# Altium footprint library WE-D-SUB.PcbLib: 41 footprints (part 2 of 3)
Each footprint in its own frame and in the unit in brackets; x right, y up, seen from the top. Pads: shape width x height; smd on the part's side, far side on the other; paste and mask are expansions set on the pad; w line width, h text height; cw(c..) or ccw(c..) is an arc to the next point about the centre after c.
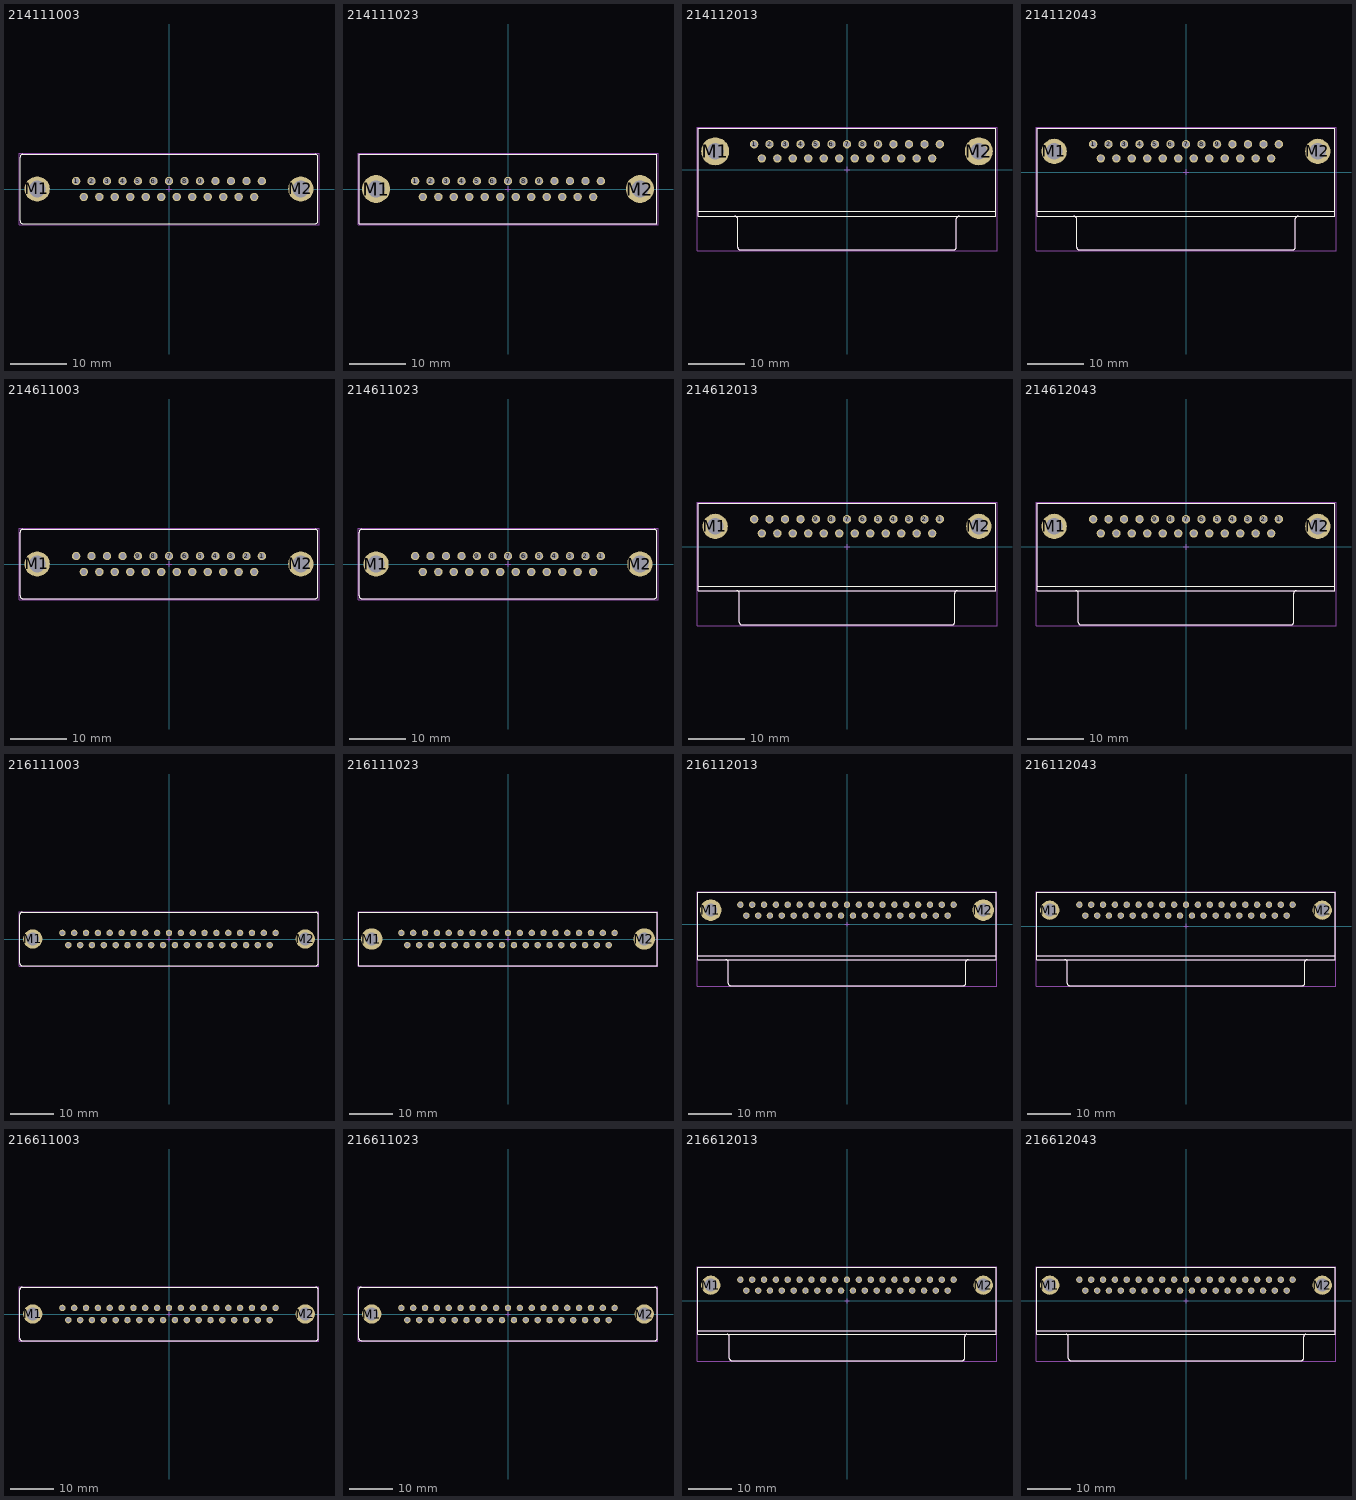
[diagram p1: the footprints below, top view; thin cyan lines are the x and y axes]

## 214111003 [mm] "D-SUB-Filter, Solder Pin Straight, Male, 25p"
height 12.2
pads (27):
  round 1.5 hole 1: 1(-16.56,1.42) 2(-13.82,1.42) 3(-11.05,1.42) 4(-8.28,1.42) 5(-5.54,1.42) 6(-2.77,1.42) 7(0,1.42) 8(2.77,1.42) 9(5.54,1.42) 10(8.28,1.42) 11(11.05,1.42) 12(13.82,1.42) 13(16.56,1.42) 14(-15.19,-1.42) 15(-12.42,-1.42) 16(-9.68,-1.42) 17(-6.91,-1.42) 18(-4.14,-1.42) 19(-1.38,-1.42) 20(1.38,-1.42) 21(4.14,-1.42) 22(6.91,-1.42) 23(9.68,-1.42) 24(12.42,-1.42) 25(15.19,-1.42)
  round 4.5 hole 3: M1(-23.5,0) M2(23.5,0)
Top Overlay:
  lines w0.2: -26.55,-5.7 ccw(c-26.05,-5.7) -26.05,-6.2 26.05,-6.2 ccw(c26.05,-5.7) 26.55,-5.7 26.55,5.7 ccw(c26.05,5.7) 26.05,6.2 -26.05,6.2 ccw(c-26.05,5.7) -26.55,5.7 -26.55,-5.7
Top Courtyard:
  lines w0.05: -0.5,0 0.5,0 ; 0,-0.5 0,0.5 ; -26.75,-6.4 26.75,-6.4 26.75,6.4 -26.75,6.4 -26.75,-6.4
3D body "214111003.stp": height 11.9, standoff -5.1, extent -26.55,-6.2 26.55,6.2

## 214111023 [mm] "D-SUB-Filter, Solder Pin Straight, Male, 25p"
height 11.8
pads (27):
  round 1.5 hole 1: 1(-16.56,1.42) 2(-13.82,1.42) 3(-11.05,1.42) 4(-8.28,1.42) 5(-5.54,1.42) 6(-2.77,1.42) 7(0,1.42) 8(2.77,1.42) 9(5.54,1.42) 10(8.28,1.42) 11(11.05,1.42) 12(13.82,1.42) 13(16.56,1.42) 14(-15.19,-1.42) 15(-12.42,-1.42) 16(-9.68,-1.42) 17(-6.91,-1.42) 18(-4.14,-1.42) 19(-1.38,-1.42) 20(1.38,-1.42) 21(4.14,-1.42) 22(6.91,-1.42) 23(9.68,-1.42) 24(12.42,-1.42) 25(15.19,-1.42)
  round 5 hole 3: M1(-23.52,0) M2(23.52,0)
Top Overlay:
  lines w0.2: -26.55,-6.2 26.55,-6.2 26.55,6.2 -26.55,6.2 -26.55,-6.2
Top 3D Body:
  lines w0.1: -26.55,-6.2 -26.55,6.2 26.55,6.2 26.55,-6.2 -26.55,-6.2
Top Courtyard:
  lines w0.05: -0.5,0 0.5,0 ; 0,-0.5 0,0.5 ; -26.75,-6.4 -26.75,6.4 26.75,6.4 26.75,-6.4 -26.75,-6.4
3D body "214111023.stp": height 11.9, standoff -5.1, extent -26.55,-6.2 26.55,6.2

## 214112013 [mm] "D-SUB-Filter, Solder Pin Angled,  Male, 25p"
height 12.4
pads (27):
  round 1.5 hole 1: 1(-16.56,4.54) 2(-13.82,4.54) 3(-11.05,4.54) 4(-8.28,4.54) 5(-5.54,4.54) 6(-2.77,4.54) 7(0,4.54) 8(2.77,4.54) 9(5.54,4.54) 10(8.28,4.54) 11(11.05,4.54) 12(13.82,4.54) 13(16.56,4.54) 14(-15.19,2) 15(-12.42,2) 16(-9.68,2) 17(-6.91,2) 18(-4.14,2) 19(-1.38,2) 20(1.38,2) 21(4.14,2) 22(6.91,2) 23(9.68,2) 24(12.42,2) 25(15.19,2)
  round 5 hole 3: M1(-23.5,3.27) M2(23.5,3.27)
Top Overlay:
  lines w0.2: -26.55,-7.4 26.55,-7.4 ; -20,-8.3 cw(c-20,-8.8) -19.5,-8.8 -19.5,-13.8 ccw(c-19,-13.8) -19,-14.3 19,-14.3 ccw(c19,-13.8) 19.5,-13.8 19.5,-8.8 cw(c20,-8.8) 20,-8.3 ; -26.55,-8.3 -26.55,7.4 26.55,7.4 26.55,-8.3 -26.55,-8.3
Top 3D Body:
  lines w0.1: -26.55,-7.4 26.55,-7.4 ; -20,-8.3 cw(c-20,-8.8) -19.5,-8.8 -19.5,-13.8 ccw(c-19,-13.8) -19,-14.3 19,-14.3 ccw(c19,-13.8) 19.5,-13.8 19.5,-8.8 cw(c20,-8.8) 20,-8.3 ; -26.55,-8.3 26.55,-8.3 26.55,7.4 -26.55,7.4 -26.55,-8.3
Top Courtyard:
  lines w0.05: -0.5,0 0.5,0 ; 0,-0.5 0,0.5 ; -26.75,-14.5 -26.75,7.6 26.75,7.6 26.75,-14.5 -26.75,-14.5
3D body "214112013.stp": height 13.65, standoff -3.55, extent -26.55,-14.3 26.55,7.4

## 214112043 [mm] "D-SUB-Filter Bent 90¡ã THT, Male, 25p"
height 12.4
pads (27):
  round 1.5 hole 1: 1(-16.56,4.99) 2(-13.82,4.99) 3(-11.05,4.99) 4(-8.28,4.99) 5(-5.54,4.99) 6(-2.77,4.99) 7(0,4.99) 8(2.77,4.99) 9(5.54,4.99) 10(8.28,4.99) 11(11.05,4.99) 12(13.82,4.99) 13(16.56,4.99) 14(-15.19,2.45) 15(-12.42,2.45) 16(-9.68,2.45) 17(-6.91,2.45) 18(-4.14,2.45) 19(-1.38,2.45) 20(1.38,2.45) 21(4.14,2.45) 22(6.91,2.45) 23(9.68,2.45) 24(12.42,2.45) 25(15.19,2.45)
  round 4.5 hole 3: M1(-23.5,3.72) M2(23.5,3.72)
Top Overlay:
  lines w0.2: -26.55,-6.95 26.55,-6.95 ; -20,-7.85 cw(c-20,-8.35) -19.5,-8.35 -19.5,-13.35 ccw(c-19,-13.35) -19,-13.85 19,-13.85 ccw(c19,-13.35) 19.5,-13.35 19.5,-8.35 cw(c20,-8.35) 20,-7.85 ; -26.55,-7.85 -26.55,7.85 26.55,7.85 26.55,-7.85 -26.55,-7.85
Top 3D Body:
  lines w0.1: -26.55,-6.95 26.55,-6.95 ; -20,-7.85 cw(c-20,-8.35) -19.5,-8.35 -19.5,-13.35 ccw(c-19,-13.35) -19,-13.85 19,-13.85 ccw(c19,-13.35) 19.5,-13.35 19.5,-8.35 cw(c20,-8.35) 20,-7.85 ; -26.55,-7.85 26.55,-7.85 26.55,7.85 -26.55,7.85 -26.55,-7.85
Top Courtyard:
  lines w0.05: -0.5,0 0.5,0 ; 0,-0.5 0,0.5 ; -26.75,-14.05 -26.75,8.05 26.75,8.05 26.75,-14.05 -26.75,-14.05
3D body "214112043.stp": height 13.75, standoff -3.05, extent -26.55,-13.85 26.55,7.85

## 214611003 [mm] "D-SUB-Filter, Solder Pin Straight, Female, 25p"
height 12.2
pads (27):
  round 1.5 hole 1: 1(16.56,1.42) 2(13.82,1.42) 3(11.05,1.42) 4(8.28,1.42) 5(5.54,1.42) 6(2.77,1.42) 7(0,1.42) 8(-2.77,1.42) 9(-5.54,1.42) 10(-8.28,1.42) 11(-11.05,1.42) 12(-13.82,1.42) 13(-16.56,1.42) 14(15.19,-1.42) 15(12.42,-1.42) 16(9.68,-1.42) 17(6.91,-1.42) 18(4.14,-1.42) 19(1.38,-1.42) 20(-1.38,-1.42) 21(-4.14,-1.42) 22(-6.91,-1.42) 23(-9.68,-1.42) 24(-12.42,-1.42) 25(-15.19,-1.42)
  round 4.5 hole 3: M1(-23.5,0) M2(23.5,0)
Top Overlay:
  lines w0.2: -26.55,-5.7 ccw(c-26.05,-5.7) -26.05,-6.2 26.05,-6.2 ccw(c26.05,-5.7) 26.55,-5.7 26.55,5.7 ccw(c26.05,5.7) 26.05,6.2 -26.05,6.2 ccw(c-26.05,5.7) -26.55,5.7 -26.55,-5.7
Top 3D Body:
  lines w0.1: -26.55,-5.7 ccw(c-26.05,-5.7) -26.05,-6.2 26.05,-6.2 ccw(c26.05,-5.7) 26.55,-5.7 26.55,5.7 ccw(c26.05,5.7) 26.05,6.2 -26.05,6.2 ccw(c-26.05,5.7) -26.55,5.7 -26.55,-5.7
Top Courtyard:
  lines w0.05: -0.5,0 0.5,0 ; 0,-0.5 0,0.5 ; -26.75,-6.4 26.75,-6.4 26.75,6.4 -26.75,6.4 -26.75,-6.4
3D body "214611003.stp": height 11.9, standoff -5.1, extent -26.55,-6.2 26.55,6.2

## 214611023 [mm] "D-SUB-Filter, Solder Pin Straight, Female, 25p"
height 11.8
pads (27):
  round 1.5 hole 1: 1(16.56,1.42) 2(13.82,1.42) 3(11.05,1.42) 4(8.28,1.42) 5(5.54,1.42) 6(2.77,1.42) 7(0,1.42) 8(-2.77,1.42) 9(-5.54,1.42) 10(-8.28,1.42) 11(-11.05,1.42) 12(-13.82,1.42) 13(-16.56,1.42) 14(15.19,-1.42) 15(12.42,-1.42) 16(9.68,-1.42) 17(6.91,-1.42) 18(4.14,-1.42) 19(1.38,-1.42) 20(-1.38,-1.42) 21(-4.14,-1.42) 22(-6.91,-1.42) 23(-9.68,-1.42) 24(-12.42,-1.42) 25(-15.19,-1.42)
  round 4.5 hole 3: M1(-23.52,0) M2(23.52,0)
Top Overlay:
  lines w0.2: -26.55,-5.7 ccw(c-26.05,-5.7) -26.05,-6.2 26.05,-6.2 ccw(c26.05,-5.7) 26.55,-5.7 26.55,5.7 ccw(c26.05,5.7) 26.05,6.2 -26.05,6.2 ccw(c-26.05,5.7) -26.55,5.7 -26.55,-5.7
Top 3D Body:
  lines w0.1: -26.55,-5.7 ccw(c-26.05,-5.7) -26.05,-6.2 26.05,-6.2 ccw(c26.05,-5.7) 26.55,-5.7 26.55,5.7 ccw(c26.05,5.7) 26.05,6.2 -26.05,6.2 ccw(c-26.05,5.7) -26.55,5.7 -26.55,-5.7
Top Courtyard:
  lines w0.05: -0.5,0 0.5,0 ; 0,-0.5 0,0.5 ; -26.75,-6.4 -26.75,6.4 26.75,6.4 26.75,-6.4 -26.75,-6.4
3D body "214611023.stp": height 11.9, standoff -5.1, extent -26.55,-6.2 26.55,6.2

## 214612013 [mm] "D-SUB-Filter Bent 90¡ã THT, Female, 25p"
height 12.4
pads (27):
  round 1.5 hole 1: 1(16.56,4.94) 2(13.82,4.94) 3(11.05,4.94) 4(8.28,4.94) 5(5.54,4.94) 6(2.77,4.94) 7(0,4.94) 8(-2.77,4.94) 9(-5.54,4.94) 10(-8.28,4.94) 11(-11.05,4.94) 12(-13.82,4.94) 13(-16.56,4.94) 14(15.19,2.4) 15(12.42,2.4) 16(9.68,2.4) 17(6.91,2.4) 18(4.14,2.4) 19(1.38,2.4) 20(-1.38,2.4) 21(-4.14,2.4) 22(-6.91,2.4) 23(-9.68,2.4) 24(-12.42,2.4) 25(-15.19,2.4)
  round 4.5 hole 3: M1(-23.5,3.67) M2(23.5,3.67)
Top Overlay:
  lines w0.2: -26.55,-7 26.55,-7 ; -19.7,-7.8 cw(c-19.7,-8.3) -19.2,-8.3 -19.2,-13.4 ccw(c-18.7,-13.4) -18.7,-13.9 18.7,-13.9 ccw(c18.7,-13.4) 19.2,-13.4 19.2,-8.3 cw(c19.7,-8.3) 19.7,-7.8 ; -26.55,-7.8 26.55,-7.8 26.55,7.8 -26.55,7.8 -26.55,-7.8
Top 3D Body:
  lines w0.1: -26.55,-7 26.55,-7 ; -19.7,-7.8 cw(c-19.7,-8.3) -19.2,-8.3 -19.2,-13.4 ccw(c-18.7,-13.4) -18.7,-13.9 18.7,-13.9 ccw(c18.7,-13.4) 19.2,-13.4 19.2,-8.3 cw(c19.7,-8.3) 19.7,-7.8 ; -26.55,-7.8 -26.55,7.8 26.55,7.8 26.55,-7.8 -26.55,-7.8
Top Courtyard:
  lines w0.05: -0.5,0 0.5,0 ; 0,-0.5 0,0.5 ; -26.75,-14.1 -26.75,8 26.75,8 26.75,-14.1 -26.75,-14.1
3D body "214612013.stp": height 13.75, standoff -3.45, extent -26.55,-13.9 26.55,7.8

## 214612043 [mm] "D-SUB-Filter Bent 90¡ã THT, Female, 25p"
height 12.4
pads (27):
  round 1.5 hole 1: 1(16.56,4.94) 2(13.82,4.94) 3(11.05,4.94) 4(8.28,4.94) 5(5.54,4.94) 6(2.77,4.94) 7(0,4.94) 8(-2.77,4.94) 9(-5.54,4.94) 10(-8.28,4.94) 11(-11.05,4.94) 12(-13.82,4.94) 13(-16.56,4.94) 14(15.19,2.4) 15(12.42,2.4) 16(9.68,2.4) 17(6.91,2.4) 18(4.14,2.4) 19(1.38,2.4) 20(-1.38,2.4) 21(-4.14,2.4) 22(-6.91,2.4) 23(-9.68,2.4) 24(-12.42,2.4) 25(-15.19,2.4)
  round 4.5 hole 3: M1(-23.5,3.67) M2(23.5,3.67)
Top Overlay:
  lines w0.2: -26.55,-7 26.55,-7 ; -19.7,-7.8 cw(c-19.7,-8.3) -19.2,-8.3 -19.2,-13.4 ccw(c-18.7,-13.4) -18.7,-13.9 18.7,-13.9 ccw(c18.7,-13.4) 19.2,-13.4 19.2,-8.3 cw(c19.7,-8.3) 19.7,-7.8 ; -26.55,-7.8 26.55,-7.8 26.55,7.8 -26.55,7.8 -26.55,-7.8
Top 3D Body:
  lines w0.1: -26.55,-7 26.55,-7 ; -19.7,-7.8 cw(c-19.7,-8.3) -19.2,-8.3 -19.2,-13.4 ccw(c-18.7,-13.4) -18.7,-13.9 18.7,-13.9 ccw(c18.7,-13.4) 19.2,-13.4 19.2,-8.3 cw(c19.7,-8.3) 19.7,-7.8 ; -26.55,-7.8 -26.55,7.8 26.55,7.8 26.55,-7.8 -26.55,-7.8
Top Courtyard:
  lines w0.05: -0.5,0 0.5,0 ; 0,-0.5 0,0.5 ; -26.75,-14.1 26.75,-14.1 26.75,8 -26.75,8 -26.75,-14.1
3D body "214612043.stp": height 13.75, standoff -3.05, extent -26.55,-13.9 26.55,7.8

## 216111003 [mm] "D-SUB-Filter, Solder Pin Straight, Male, 37p"
height 12.2
pads (39):
  round 1.5 hole 1: 1(-24.84,1.42) 2(-22.1,1.42) 3(-19.33,1.42) 4(-16.56,1.42) 5(-13.82,1.42) 6(-11.05,1.42) 7(-8.28,1.42) 8(-5.54,1.42) 9(-2.77,1.42) 10(0,1.42) 11(2.77,1.42) 12(5.54,1.42) 13(8.28,1.42) 14(11.05,1.42) 15(13.82,1.42) 16(16.56,1.42) 17(19.33,1.42) 18(22.1,1.42) 19(24.84,1.42) 20(-23.47,-1.42) 21(-20.7,-1.42) 22(-17.96,-1.42) 23(-15.19,-1.42) 24(-12.42,-1.42) 25(-9.68,-1.42) 26(-6.91,-1.42) 27(-4.14,-1.42) 28(-1.38,-1.42) 29(1.38,-1.42) 30(4.14,-1.42) 31(6.91,-1.42) 32(9.68,-1.42) 33(12.42,-1.42) 34(15.19,-1.42) 35(17.96,-1.42) 36(20.7,-1.42) 37(23.47,-1.42)
  round 4.5 hole 3: M1(-31.75,0) M2(31.75,0)
Top Overlay:
  lines w0.2: -34.75,-5.7 ccw(c-34.25,-5.7) -34.25,-6.2 34.25,-6.2 ccw(c34.25,-5.7) 34.75,-5.7 34.75,5.7 ccw(c34.25,5.7) 34.25,6.2 -34.25,6.2 ccw(c-34.25,5.7) -34.75,5.7 -34.75,-5.7
Top Courtyard:
  lines w0.05: -0.5,0 0.5,0 ; 0,-0.5 0,0.5 ; -34.95,-6.4 -34.95,6.4 34.95,6.4 34.95,-6.4 -34.95,-6.4
3D body "216111003.stp": height 11.9, standoff -5.1, extent -34.75,-6.2 34.75,6.2

## 216111023 [mm] "D-SUB-Filter, Solder Pin Straight, Male, 37p"
height 11.8
pads (39):
  round 1.5 hole 1: 1(-24.84,1.42) 2(-22.1,1.42) 3(-19.33,1.42) 4(-16.56,1.42) 5(-13.82,1.42) 6(-11.05,1.42) 7(-8.28,1.42) 8(-5.54,1.42) 9(-2.77,1.42) 10(0,1.42) 11(2.77,1.42) 12(5.54,1.42) 13(8.28,1.42) 14(11.05,1.42) 15(13.82,1.42) 16(16.56,1.42) 17(19.33,1.42) 18(22.1,1.42) 19(24.84,1.42) 20(-23.47,-1.42) 21(-20.7,-1.42) 22(-17.96,-1.42) 23(-15.19,-1.42) 24(-12.42,-1.42) 25(-9.68,-1.42) 26(-6.91,-1.42) 27(-4.14,-1.42) 28(-1.385,-1.42) 29(1.385,-1.42) 30(4.14,-1.42) 31(6.91,-1.42) 32(9.68,-1.42) 33(12.42,-1.42) 34(15.19,-1.42) 35(17.96,-1.42) 36(20.7,-1.42) 37(23.47,-1.42)
  round 5 hole 3: M1(-31.75,0) M2(31.75,0)
Top Overlay:
  lines w0.2: -34.75,-6.2 34.75,-6.2 34.75,6.2 -34.75,6.2 -34.75,-6.2
Top 3D Body:
  lines w0.1: -34.75,-6.2 -34.75,6.2 34.75,6.2 34.75,-6.2 -34.75,-6.2
Top Courtyard:
  lines w0.05: -0.5,0 0.5,0 ; 0,-0.5 0,0.5 ; -34.95,-6.4 -34.95,6.4 34.95,6.4 34.95,-6.4 -34.95,-6.4
3D body "216111023.stp": height 11.9, standoff -5.1, extent -34.75,-6.2 34.75,6.2

## 216112013 [mm] "D-SUB-Filter, Solder Pin Angled,  Male, 37p"
height 12.4
pads (39):
  round 1.5 hole 1: 1(-24.84,4.54) 2(-22.1,4.54) 3(-19.33,4.54) 4(-16.56,4.54) 5(-13.82,4.54) 6(-11.05,4.54) 7(-8.28,4.54) 8(-5.54,4.54) 9(-2.77,4.54) 10(0,4.54) 11(2.77,4.54) 12(5.54,4.54) 13(8.28,4.54) 14(11.05,4.54) 15(13.82,4.54) 16(16.56,4.54) 17(19.33,4.54) 18(22.1,4.54) 19(24.84,4.54) 20(-23.47,2) 21(-20.7,2) 22(-17.96,2) 23(-15.19,2) 24(-12.42,2) 25(-9.68,2) 26(-6.91,2) 27(-4.14,2) 28(-1.385,2) 29(1.385,2) 30(4.14,2) 31(6.91,2) 32(9.68,2) 33(12.42,2) 34(15.19,2) 35(17.96,2) 36(20.7,2) 37(23.47,2)
  round 5 hole 3: M1(-31.75,3.27) M2(31.75,3.27)
Top Overlay:
  lines w0.2: -34.75,-7.4 34.75,-7.4 ; -28.2,-8.3 cw(c-28.2,-8.8) -27.7,-8.8 -27.7,-13.8 ccw(c-27.2,-13.8) -27.2,-14.3 27.2,-14.3 ccw(c27.2,-13.8) 27.7,-13.8 27.7,-8.8 cw(c28.2,-8.8) 28.2,-8.3 ; -34.75,-8.3 34.75,-8.3 34.75,7.4 -34.75,7.4 -34.75,-8.3
Top 3D Body:
  lines w0.1: -34.75,-7.4 34.75,-7.4 ; -28.2,-8.3 cw(c-28.2,-8.8) -27.7,-8.8 -27.7,-13.8 ccw(c-27.2,-13.8) -27.2,-14.3 27.2,-14.3 ccw(c27.2,-13.8) 27.7,-13.8 27.7,-8.8 cw(c28.2,-8.8) 28.2,-8.3 ; -34.75,-8.3 -34.75,7.4 34.75,7.4 34.75,-8.3 -34.75,-8.3
Top Courtyard:
  lines w0.05: -0.5,0 0.5,0 ; 0,-0.5 0,0.5 ; -34.95,-14.5 34.95,-14.5 34.95,7.6 -34.95,7.6 -34.95,-14.5
3D body "216112013.stp": height 13.65, standoff -3.55, extent -34.75,-14.3 34.75,7.4

## 216112043 [mm] "D-SUB-Filter Bent 90¡ã THT, Male, 37p"
height 12.4
pads (39):
  round 1.5 hole 1: 1(-24.84,4.99) 2(-22.1,4.99) 3(-19.33,4.99) 4(-16.56,4.99) 5(-13.82,4.99) 6(-11.05,4.99) 7(-8.28,4.99) 8(-5.54,4.99) 9(-2.77,4.99) 10(0,4.99) 11(2.77,4.99) 12(5.54,4.99) 13(8.28,4.99) 14(11.05,4.99) 15(13.82,4.99) 16(16.56,4.99) 17(19.33,4.99) 18(22.1,4.99) 19(24.84,4.99) 20(-23.47,2.45) 21(-20.7,2.45) 22(-17.96,2.45) 23(-15.19,2.45) 24(-12.42,2.45) 25(-9.68,2.45) 26(-6.91,2.45) 27(-4.14,2.45) 28(-1.385,2.45) 29(1.385,2.45) 30(4.14,2.45) 31(6.91,2.45) 32(9.68,2.45) 33(12.42,2.45) 34(15.19,2.45) 35(17.96,2.45) 36(20.7,2.45) 37(23.47,2.45)
  round 4.5 hole 3: M1(-31.75,3.72) M2(31.75,3.72)
Top Overlay:
  lines w0.2: -34.75,-6.95 34.75,-6.95 ; -28.2,-7.85 cw(c-28.2,-8.35) -27.7,-8.35 -27.7,-13.35 ccw(c-27.2,-13.35) -27.2,-13.85 27.2,-13.85 ccw(c27.2,-13.35) 27.7,-13.35 27.7,-8.35 cw(c28.2,-8.35) 28.2,-7.85 ; -34.75,-7.85 34.75,-7.85 34.75,7.85 -34.75,7.85 -34.75,-7.85
Top 3D Body:
  lines w0.1: -34.75,-6.95 34.75,-6.95 ; -28.2,-7.85 cw(c-28.2,-8.35) -27.7,-8.35 -27.7,-13.35 ccw(c-27.2,-13.35) -27.2,-13.85 27.2,-13.85 ccw(c27.2,-13.35) 27.7,-13.35 27.7,-8.35 cw(c28.2,-8.35) 28.2,-7.85 ; -34.75,-7.85 -34.75,7.85 34.75,7.85 34.75,-7.85 -34.75,-7.85
Top Courtyard:
  lines w0.05: -0.5,0 0.5,0 ; 0,-0.5 0,0.5 ; -34.95,-14.05 -34.95,8.05 34.95,8.05 34.95,-14.05 -34.95,-14.05
3D body "216112043.stp": height 13.75, standoff -3.05, extent -34.75,-13.85 34.75,7.85

## 216611003 [mm] "D-SUB-Filter, Solder Pin Straight, Female, 37p"
height 12.2
pads (39):
  round 1.5 hole 1: 1(24.84,1.42) 2(22.1,1.42) 3(19.33,1.42) 4(16.56,1.42) 5(13.82,1.42) 6(11.05,1.42) 7(8.28,1.42) 8(5.54,1.42) 9(2.77,1.42) 10(0,1.42) 11(-2.77,1.42) 12(-5.54,1.42) 13(-8.28,1.42) 14(-11.05,1.42) 15(-13.82,1.42) 16(-16.56,1.42) 17(-19.33,1.42) 18(-22.1,1.42) 19(-24.84,1.42) 20(23.47,-1.42) 21(20.7,-1.42) 22(17.96,-1.42) 23(15.19,-1.42) 24(12.42,-1.42) 25(9.68,-1.42) 26(6.91,-1.42) 27(4.14,-1.42) 28(1.38,-1.42) 29(-1.38,-1.42) 30(-4.14,-1.42) 31(-6.91,-1.42) 32(-9.68,-1.42) 33(-12.42,-1.42) 34(-15.19,-1.42) 35(-17.96,-1.42) 36(-20.7,-1.42) 37(-23.47,-1.42)
  round 4.5 hole 3: M1(-31.75,0) M2(31.75,0)
Top Overlay:
  lines w0.2: -34.75,-5.7 ccw(c-34.25,-5.7) -34.25,-6.2 34.25,-6.2 ccw(c34.25,-5.7) 34.75,-5.7 34.75,5.7 ccw(c34.25,5.7) 34.25,6.2 -34.25,6.2 ccw(c-34.25,5.7) -34.75,5.7 -34.75,-5.7
Top 3D Body:
  lines w0.1: -34.75,-5.7 ccw(c-34.25,-5.7) -34.25,-6.2 34.25,-6.2 ccw(c34.25,-5.7) 34.75,-5.7 34.75,5.7 ccw(c34.25,5.7) 34.25,6.2 -34.25,6.2 ccw(c-34.25,5.7) -34.75,5.7 -34.75,-5.7
Top Courtyard:
  lines w0.05: -0.5,0 0.5,0 ; 0,-0.5 0,0.5 ; -34.95,-6.4 34.95,-6.4 34.95,6.4 -34.95,6.4 -34.95,-6.4
3D body "216611003.stp": height 11.9, standoff -5.1, extent -34.75,-6.2 34.75,6.2

## 216611023 [mm] "D-SUB-Filter, Solder Pin Straight, Female, 37p"
height 11.8
pads (39):
  round 1.5 hole 1: 1(24.84,1.42) 2(22.1,1.42) 3(19.33,1.42) 4(16.56,1.42) 5(13.82,1.42) 6(11.05,1.42) 7(8.28,1.42) 8(5.54,1.42) 9(2.77,1.42) 10(0,1.42) 11(-2.77,1.42) 12(-5.54,1.42) 13(-8.28,1.42) 14(-11.05,1.42) 15(-13.82,1.42) 16(-16.56,1.42) 17(-19.33,1.42) 18(-22.1,1.42) 19(-24.84,1.42) 20(23.47,-1.42) 21(20.7,-1.42) 22(17.96,-1.42) 23(15.19,-1.42) 24(12.42,-1.42) 25(9.68,-1.42) 26(6.91,-1.42) 27(4.14,-1.42) 28(1.385,-1.42) 29(-1.385,-1.42) 30(-4.14,-1.42) 31(-6.91,-1.42) 32(-9.68,-1.42) 33(-12.42,-1.42) 34(-15.19,-1.42) 35(-17.96,-1.42) 36(-20.7,-1.42) 37(-23.47,-1.42)
  round 4.5 hole 3: M1(-31.75,0) M2(31.75,0)
Top Overlay:
  lines w0.2: -34.75,-5.7 -34.75,5.7 ; -34.75,-5.68 ccw(c-34.25,-5.68) -34.25,-6.18 34.25,-6.18 ; -34.75,5.72 cw(c-34.25,5.72) -34.25,6.22 34.25,6.22 ; 34.25,-6.2 ccw(c34.25,-5.7) 34.75,-5.7 34.75,5.7 ccw(c34.25,5.7) 34.25,6.2
Top 3D Body:
  lines w0.1: -34.75,-5.7 -34.75,5.7 ; -34.75,-5.68 ccw(c-34.25,-5.68) -34.25,-6.18 34.25,-6.18 ; -34.75,5.72 cw(c-34.25,5.72) -34.25,6.22 34.25,6.22 ; 34.25,-6.2 ccw(c34.25,-5.7) 34.75,-5.7 34.75,5.7 ccw(c34.25,5.7) 34.25,6.2
Top Courtyard:
  lines w0.05: -0.5,0 0.5,0 ; 0,-0.5 0,0.5 ; -34.95,-6.4 34.95,-6.4 34.95,6.4 -34.95,6.4 -34.95,-6.4
3D body "216611023.stp": height 11.9, standoff -5.1, extent -34.75,-6.2 34.75,6.2

## 216612013 [mm] "D-SUB-Filter Bent 90¡ã THT, Female, 37p"
height 12.4
pads (39):
  round 1.5 hole 1: 1(24.84,4.94) 2(22.1,4.94) 3(19.33,4.94) 4(16.56,4.94) 5(13.82,4.94) 6(11.05,4.94) 7(8.28,4.94) 8(5.54,4.94) 9(2.77,4.94) 10(0,4.94) 11(-2.77,4.94) 12(-5.54,4.94) 13(-8.28,4.94) 14(-11.05,4.94) 15(-13.82,4.94) 16(-16.56,4.94) 17(-19.33,4.94) 18(-22.1,4.94) 19(-24.84,4.94) 20(23.47,2.4) 21(20.7,2.4) 22(17.96,2.4) 23(15.19,2.4) 24(12.42,2.4) 25(9.68,2.4) 26(6.91,2.4) 27(4.14,2.4) 28(1.38,2.4) 29(-1.38,2.4) 30(-4.14,2.4) 31(-6.91,2.4) 32(-9.68,2.4) 33(-12.42,2.4) 34(-15.19,2.4) 35(-17.96,2.4) 36(-20.7,2.4) 37(-23.47,2.4)
  round 4.5 hole 3: M1(-31.75,3.67) M2(31.75,3.67)
Top Overlay:
  lines w0.2: -34.75,-7 34.75,-7 ; -27.9,-7.8 cw(c-27.9,-8.3) -27.4,-8.3 -27.4,-13.4 ccw(c-26.9,-13.4) -26.9,-13.9 26.9,-13.9 ccw(c26.9,-13.4) 27.4,-13.4 27.4,-8.3 cw(c27.9,-8.3) 27.9,-7.8 ; -34.75,-7.8 34.75,-7.8 34.75,7.8 -34.75,7.8 -34.75,-7.8
Top 3D Body:
  lines w0.1: -34.75,-7 34.75,-7 ; -27.9,-7.8 cw(c-27.9,-8.3) -27.4,-8.3 -27.4,-13.4 ccw(c-26.9,-13.4) -26.9,-13.9 26.9,-13.9 ccw(c26.9,-13.4) 27.4,-13.4 27.4,-8.3 cw(c27.9,-8.3) 27.9,-7.8 ; -34.75,-7.8 -34.75,7.8 34.75,7.8 34.75,-7.8 -34.75,-7.8
Top Courtyard:
  lines w0.05: -0.5,0 0.5,0 ; 0,-0.5 0,0.5 ; -34.95,-14.1 -34.95,8 34.95,8 34.95,-14.1 -34.95,-14.1
3D body "216612013.stp": height 13.75, standoff -3.45, extent -34.75,-13.9 34.75,7.8

## 216612043 [mm] "D-SUB-Filter Bent 90¡ã THT, Female, 37p"
height 12.4
pads (39):
  round 1.5 hole 1: 1(24.84,4.94) 2(22.1,4.94) 3(19.33,4.94) 4(16.56,4.94) 5(13.82,4.94) 6(11.05,4.94) 7(8.28,4.94) 8(5.54,4.94) 9(2.77,4.94) 10(0,4.94) 11(-2.77,4.94) 12(-5.54,4.94) 13(-8.28,4.94) 14(-11.05,4.94) 15(-13.82,4.94) 16(-16.56,4.94) 17(-19.33,4.94) 18(-22.1,4.94) 19(-24.84,4.94) 20(23.47,2.4) 21(20.7,2.4) 22(17.96,2.4) 23(15.19,2.4) 24(12.42,2.4) 25(9.68,2.4) 26(6.91,2.4) 27(4.14,2.4) 28(1.38,2.4) 29(-1.38,2.4) 30(-4.14,2.4) 31(-6.91,2.4) 32(-9.68,2.4) 33(-12.42,2.4) 34(-15.19,2.4) 35(-17.96,2.4) 36(-20.7,2.4) 37(-23.47,2.4)
  round 4.5 hole 3: M1(-31.75,3.67) M2(31.75,3.67)
Top Overlay:
  lines w0.2: -34.75,-7 34.75,-7 ; -27.9,-7.8 cw(c-27.9,-8.3) -27.4,-8.3 -27.4,-13.4 ccw(c-26.9,-13.4) -26.9,-13.9 26.9,-13.9 ccw(c26.9,-13.4) 27.4,-13.4 27.4,-8.3 cw(c27.9,-8.3) 27.9,-7.8 ; -34.75,-7.8 -34.75,7.8 34.75,7.8 34.75,-7.8 -34.75,-7.8
Top 3D Body:
  lines w0.1: -34.75,-7 34.75,-7 ; -27.9,-7.8 cw(c-27.9,-8.3) -27.4,-8.3 -27.4,-13.4 ccw(c-26.9,-13.4) -26.9,-13.9 26.9,-13.9 ccw(c26.9,-13.4) 27.4,-13.4 27.4,-8.3 cw(c27.9,-8.3) 27.9,-7.8 ; -34.75,-7.8 34.75,-7.8 34.75,7.8 -34.75,7.8 -34.75,-7.8
Top Courtyard:
  lines w0.05: -0.5,0 0.5,0 ; 0,-0.5 0,0.5 ; -34.95,-14.1 34.95,-14.1 34.95,8 -34.95,8 -34.95,-14.1
3D body "216612043.stp": height 13.75, standoff -3.05, extent -34.75,-13.9 34.75,7.8